# Altium footprint library ICs_VendorSpecific.PcbLib: 247 footprints (part 12 of 19)
Each footprint in its own frame and in the unit in brackets; x right, y up, seen from the top. Pads: shape width x height; smd on the part's side, far side on the other; paste and mask are expansions set on the pad; w line width, h text height; cw(c..) or ccw(c..) is an arc to the next point about the centre after c.
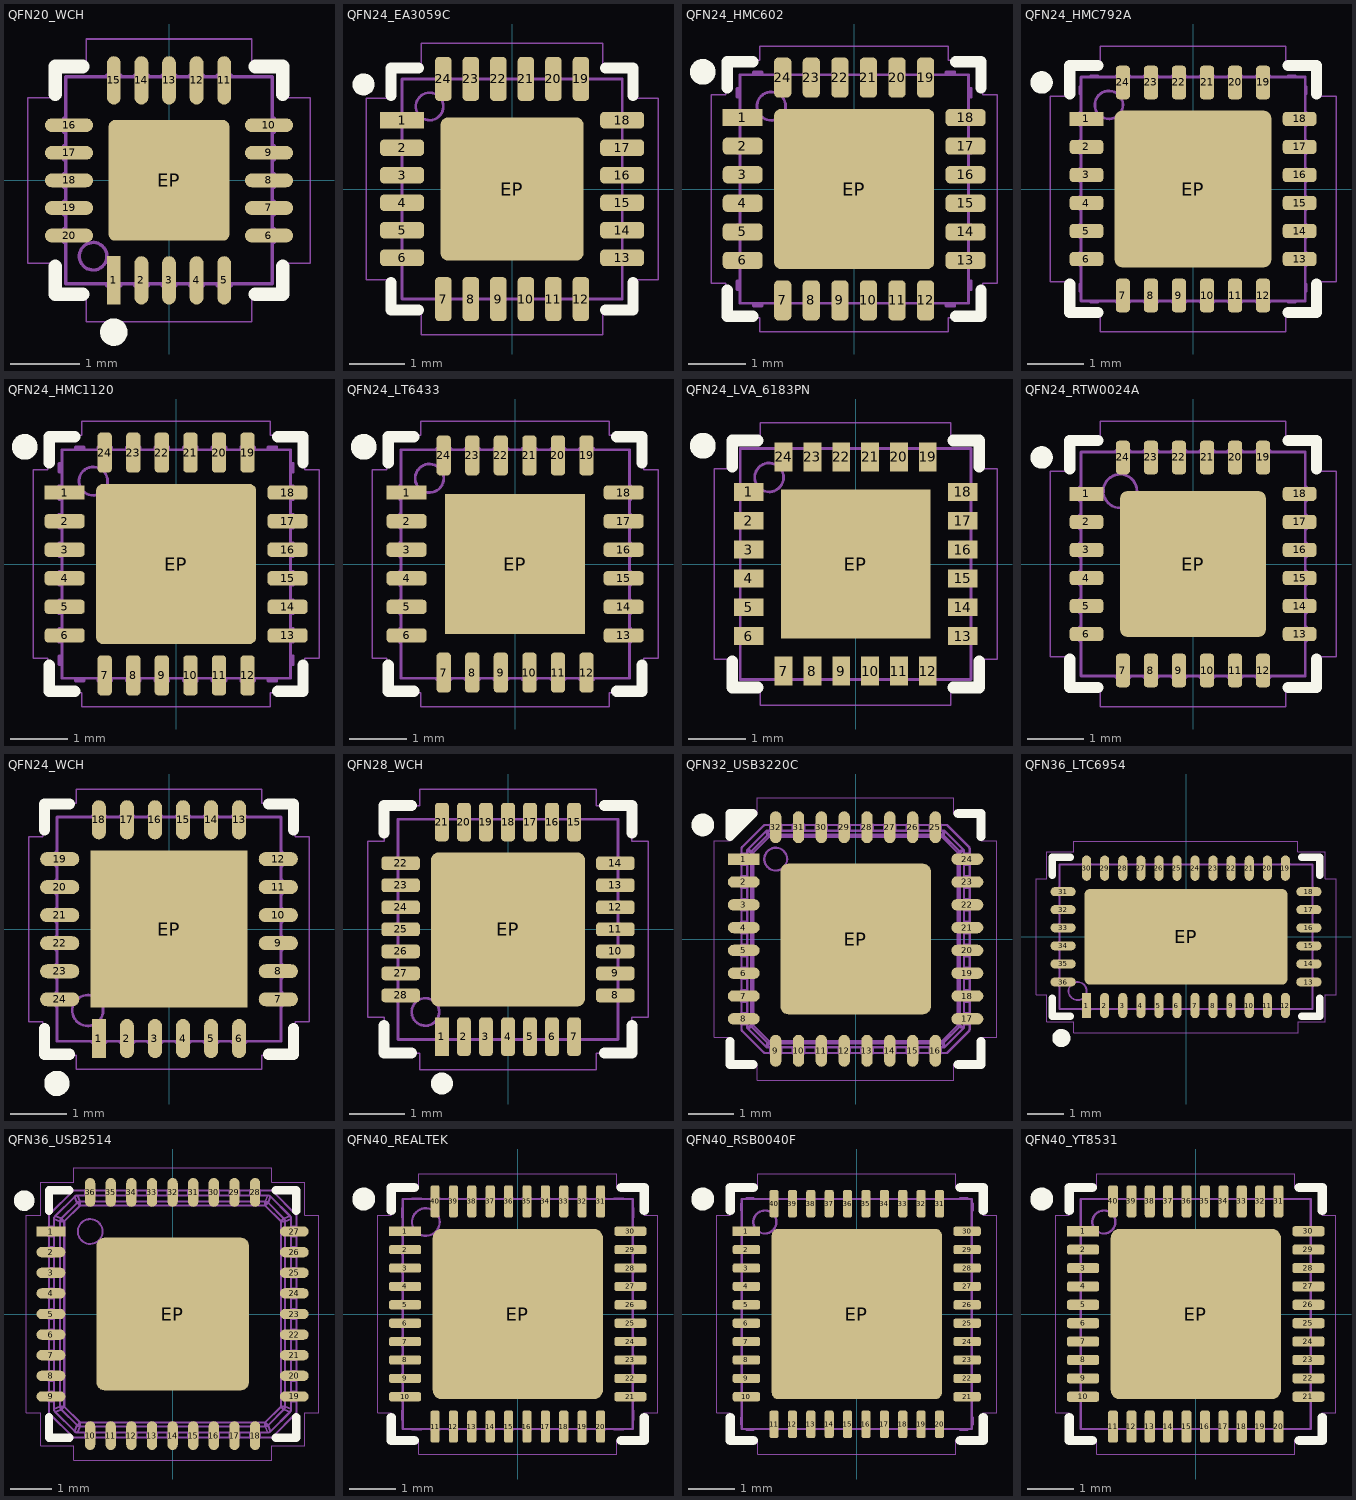
[diagram p11: the footprints below, top view; thin cyan lines are the x and y axes]

## QFN20_WCH [mm] "QFN 3mm x 3mm, 0.4mm pitch"
height 0.75
pads (21):
  rect 0.2x0.7 smd paste-0.025 mask+0.05: 1(-0.8,-1.45)
  oval 0.2x0.7 smd paste-0.025 mask+0.05: 2(-0.4,-1.45) 3(0,-1.45) 4(0.4,-1.45) 5(0.8,-1.45) 11(0.8,1.45) 12(0.4,1.45) 13(0,1.45) 14(-0.4,1.45) 15(-0.8,1.45)
  oval 0.7x0.2 smd paste-0.025 mask+0.05: 6(1.45,-0.8) 7(1.45,-0.4) 8(1.45,0) 9(1.45,0.4) 10(1.45,0.8) 16(-1.45,0.8) 17(-1.45,0.4) 18(-1.45,0) 19(-1.45,-0.4) 20(-1.45,-0.8)
  rrect10% 1.75x1.75 smd paste-3 mask+0.05: EP(0,0)
Top Overlay:
  circle w0.2: c-0.8,-2.2 r0.1
  lines w0.2: -1.65,-1.25 -1.65,-1.65 -1.25,-1.65 ; -1.65,1.25 -1.65,1.65 -1.25,1.65 ; 1.25,-1.65 1.65,-1.65 1.65,-1.25 ; 1.25,1.65 1.65,1.65 1.65,1.25
Top Paste:
  region: 0.7,0.7 0.1,0.7 0.1,0.1 0.7,0.1
  region: -0.1,0.7 -0.7,0.7 -0.7,0.1 -0.1,0.1
  region: 0.7,-0.1 0.1,-0.1 0.1,-0.7 0.7,-0.7
  region: -0.1,-0.1 -0.7,-0.1 -0.7,-0.7 -0.1,-0.7
Top Courtyard:
  lines w0.025: -2.05,-1.2 -1.7,-1.2 -1.7,-1.7 -1.2,-1.7 -1.2,-2.05 1.2,-2.05 1.2,-1.7 1.7,-1.7 1.7,-1.2 2.05,-1.2 2.05,1.2 1.7,1.2 1.7,1.7 1.2,1.7 1.2,2.05 -1.2,2.05 -1.2,1.7 -1.7,1.7 -1.7,1.2 -2.05,1.2 -2.05,-1.2
Top Assembly:
  circle w0.05: c-1.1,-1.1 r0.2
  lines w0.05: -1.5,-0.9 -1.525,-0.9 -1.525,-0.7 -1.5,-0.7 ; -1.5,-0.5 -1.525,-0.5 -1.525,-0.3 -1.5,-0.3 ; -1.5,-0.1 -1.525,-0.1 -1.525,0.1 -1.5,0.1 ; -1.5,0.3 -1.525,0.3 -1.525,0.5 -1.5,0.5 ; -1.5,0.7 -1.525,0.7 -1.525,0.9 -1.5,0.9 ; -0.9,-1.5 -0.9,-1.525 -0.7,-1.525 -0.7,-1.5 ; -0.9,1.5 -0.9,1.525 -0.7,1.525 -0.7,1.5 ; -0.5,-1.5 -0.5,-1.525 -0.3,-1.525 -0.3,-1.5 ; -0.5,1.5 -0.5,1.525 -0.3,1.525 -0.3,1.5 ; -0.1,-1.5 -0.1,-1.525 0.1,-1.525 0.1,-1.5 ; -0.1,1.5 -0.1,1.525 0.1,1.525 0.1,1.5 ; 0.3,-1.5 0.3,-1.525 0.5,-1.525 0.5,-1.5 ; 0.3,1.5 0.3,1.525 0.5,1.525 0.5,1.5 ; 0.7,-1.5 0.7,-1.525 0.9,-1.525 0.9,-1.5 ; 0.7,1.5 0.7,1.525 0.9,1.525 0.9,1.5 ; 1.5,-0.9 1.525,-0.9 1.525,-0.7 1.5,-0.7 ; 1.5,-0.5 1.525,-0.5 1.525,-0.3 1.5,-0.3 ; 1.5,-0.1 1.525,-0.1 1.525,0.1 1.5,0.1 ; 1.5,0.3 1.525,0.3 1.525,0.5 1.5,0.5 ; 1.5,0.7 1.525,0.7 1.525,0.9 1.5,0.9 ; -1.5,-1.5 1.5,-1.5 1.5,1.5 -1.5,1.5 -1.5,-1.5
  text ".Designator" at -2.815,-0.283 h1.25
3D body "QFN20_WCH.x_t": height 0.78, standoff 0, extent -1.525,-1.525 1.525,1.525

## QFN24_EA3059C [mm] "Power QFN 4mm x 4mm, 0.5mm pitch"
height 0.75
pads (25):
  rect 0.8x0.3 smd paste-0.025 mask+0.05: 1(-2,1.25)
  rrect50% 0.8x0.3 smd paste-0.025 mask+0.05: 2(-2,0.75) 3(-2,0.25) 4(-2,-0.25) 5(-2,-0.75) 6(-2,-1.25) 13(2,-1.25) 14(2,-0.75) 15(2,-0.25) 16(2,0.25) 17(2,0.75) 18(2,1.25)
  rrect50% 0.3x0.8 smd paste-0.025 mask+0.05: 7(-1.25,-2) 8(-0.75,-2) 9(-0.25,-2) 10(0.25,-2) 11(0.75,-2) 12(1.25,-2) 19(1.25,2) 20(0.75,2) 21(0.25,2) 22(-0.25,2) 23(-0.75,2) 24(-1.25,2)
  rrect10% 2.6x2.6 smd paste-3 mask+0.05: EP(0,0)
Top Overlay:
  circle w0.2: c-2.7,1.9 r0.1
  lines w0.2: -2.2,-1.7 -2.2,-2.2 -1.7,-2.2 ; -2.2,1.7 -2.2,2.2 -1.7,2.2 ; 1.7,-2.2 2.2,-2.2 2.2,-1.7 ; 1.7,2.2 2.2,2.2 2.2,1.7
Top Paste:
  region: -0.5,0.3 -1.1,0.3 -1.1,-0.3 -0.5,-0.3
  region: 0.3,0.3 -0.3,0.3 -0.3,-0.3 0.3,-0.3
  region: -0.5,1.1 -1.1,1.1 -1.1,0.5 -0.5,0.5
  region: 0.3,1.1 -0.3,1.1 -0.3,0.5 0.3,0.5
  region: 1.1,1.1 0.5,1.1 0.5,0.5 1.1,0.5
  region: 1.1,0.3 0.5,0.3 0.5,-0.3 1.1,-0.3
  region: -0.5,-1.1 -0.5,-0.5 -1.1,-0.5 -1.1,-1.1
  region: 0.3,-1.1 0.3,-0.5 -0.3,-0.5 -0.3,-1.1
  region: 1.1,-1.1 1.1,-0.5 0.5,-0.5 0.5,-1.1
Top Courtyard:
  lines w0.025: -2.65,-1.65 -2.65,1.65 -2.25,1.65 -2.25,2.25 -1.65,2.25 -1.65,2.65 1.65,2.65 1.65,2.25 2.25,2.25 2.25,1.65 2.65,1.65 2.65,-1.65 2.25,-1.65 2.25,-2.25 1.65,-2.25 1.65,-2.65 -1.65,-2.65 -1.65,-2.25 -2.25,-2.25 -2.25,-1.65 -2.65,-1.65
Top Assembly:
  circle w0.05: c-1.5,1.5 r0.25
  lines w0.05: -2,-1.37 -2.025,-1.37 -2.025,-1.13 -2,-1.13 ; -2,-0.87 -2.025,-0.87 -2.025,-0.63 -2,-0.63 ; -2,-0.37 -2.025,-0.37 -2.025,-0.13 -2,-0.13 ; -2,0.13 -2.025,0.13 -2.025,0.37 -2,0.37 ; -2,0.63 -2.025,0.63 -2.025,0.87 -2,0.87 ; -2,1.13 -2.025,1.13 -2.025,1.37 -2,1.37 ; -1.37,-2 -1.37,-2.025 -1.13,-2.025 -1.13,-2 ; -1.37,2 -1.37,2.025 -1.13,2.025 -1.13,2 ; -0.87,-2 -0.87,-2.025 -0.63,-2.025 -0.63,-2 ; -0.87,2 -0.87,2.025 -0.63,2.025 -0.63,2 ; -0.37,-2 -0.37,-2.025 -0.13,-2.025 -0.13,-2 ; -0.37,2 -0.37,2.025 -0.13,2.025 -0.13,2 ; 0.13,-2 0.13,-2.025 0.37,-2.025 0.37,-2 ; 0.13,2 0.13,2.025 0.37,2.025 0.37,2 ; 0.63,-2 0.63,-2.025 0.87,-2.025 0.87,-2 ; 0.63,2 0.63,2.025 0.87,2.025 0.87,2 ; 1.13,-2 1.13,-2.025 1.37,-2.025 1.37,-2 ; 1.13,2 1.13,2.025 1.37,2.025 1.37,2 ; 2,-1.37 2.025,-1.37 2.025,-1.13 2,-1.13 ; 2,-0.87 2.025,-0.87 2.025,-0.63 2,-0.63 ; 2,-0.37 2.025,-0.37 2.025,-0.13 2,-0.13 ; 2,0.13 2.025,0.13 2.025,0.37 2,0.37 ; 2,0.63 2.025,0.63 2.025,0.87 2,0.87 ; 2,1.13 2.025,1.13 2.025,1.37 2,1.37 ; -2,-2 -2,2 2,2 2,-2 -2,-2
  text ".Designator" at -4.511,-0.453 h2
3D body "QFN24_EA3059C.x_t": height 0.9, standoff 0, extent -2.025,-2.025 2.025,2.025

## QFN24_HMC602 [mm] "QFN 4mm x 4mm, 0.5mm pitch"
height 1
pads (25):
  rect 0.7x0.3 smd paste+0 mask+0.05: 1(-1.95,1.25)
  rrect50% 0.7x0.3 smd paste+0 mask+0.05: 2(-1.95,0.75) 3(-1.95,0.25) 4(-1.95,-0.25) 5(-1.95,-0.75) 6(-1.95,-1.25) 13(1.95,-1.25) 14(1.95,-0.75) 15(1.95,-0.25) 16(1.95,0.25) 17(1.95,0.75) 18(1.95,1.25)
  rrect50% 0.3x0.7 smd paste+0 mask+0.05: 7(-1.25,-1.95) 8(-0.75,-1.95) 9(-0.25,-1.95) 10(0.25,-1.95) 11(0.75,-1.95) 12(1.25,-1.95) 19(1.25,1.95) 20(0.75,1.95) 21(0.25,1.95) 22(-0.25,1.95) 23(-0.75,1.95) 24(-1.25,1.95)
  rrect8% 2.8x2.8 smd paste-3 mask+0.05: EP(0,0)
Top Overlay:
  circle w0.25: c-2.65,2.05 r0.1
  lines w0.2: -2.22,-1.775 -2.22,-2.23 -1.775,-2.23 ; -2.22,1.775 -2.22,2.23 -1.775,2.23 ; 1.775,-2.23 2.22,-2.23 2.22,-1.775 ; 1.775,2.23 2.22,2.23 2.22,1.775
Top Paste:
  rectangle: -0.6,-0.6 -0.1,-0.1
  rectangle: 0.1,-0.6 0.6,-0.1
  rectangle: 0.8,-0.6 1.3,-0.1
  region: -0.8,-0.6 -0.8,-0.1 -1.3,-0.1 -1.3,-0.6
  rectangle: -0.6,0.1 -0.1,0.6
  rectangle: 0.1,0.1 0.6,0.6
  rectangle: 0.8,0.1 1.3,0.6
  region: -0.8,0.1 -0.8,0.6 -1.3,0.6 -1.3,0.1
  rectangle: -0.6,0.8 -0.1,1.3
  rectangle: 0.1,0.8 0.6,1.3
  rectangle: 0.8,0.8 1.3,1.3
  region: -0.8,0.8 -0.8,1.3 -1.3,1.3 -1.3,0.8
  rectangle: -0.6,-1.3 -0.1,-0.8
  rectangle: 0.1,-1.3 0.6,-0.8
  rectangle: 0.8,-1.3 1.3,-0.8
  region: -0.8,-1.3 -0.8,-0.8 -1.3,-0.8 -1.3,-1.3
Top Courtyard:
  lines w0.025: -2.5,-1.65 -2.5,1.65 -2.25,1.65 -2.25,2.25 -1.65,2.25 -1.65,2.5 1.65,2.5 1.65,2.25 2.25,2.25 2.25,1.65 2.5,1.65 2.5,-1.65 2.25,-1.65 2.25,-2.25 1.65,-2.25 1.65,-2.5 -1.65,-2.5 -1.65,-2.25 -2.25,-2.25 -2.25,-1.65 -2.5,-1.65
Top Assembly:
  circle w0.05: c-1.45,1.45 r0.25
  lines w0.05: -2,-1.76 -2.05,-1.76 -2.05,-1.61 -2,-1.61 ; -2,-1.37 -2.05,-1.37 -2.05,-1.13 -2,-1.13 ; -2,-0.87 -2.05,-0.87 -2.05,-0.63 -2,-0.63 ; -2,-0.37 -2.05,-0.37 -2.05,-0.13 -2,-0.13 ; -2,0.13 -2.05,0.13 -2.05,0.37 -2,0.37 ; -2,0.63 -2.05,0.63 -2.05,0.87 -2,0.87 ; -2,1.13 -2.05,1.13 -2.05,1.37 -2,1.37 ; -2,1.61 -2.05,1.61 -2.05,1.76 -2,1.76 ; -1.76,-2 -1.76,-2.05 -1.61,-2.05 -1.61,-2 ; -1.76,2 -1.76,2.05 -1.61,2.05 -1.61,2 ; -1.37,-2 -1.37,-2.05 -1.13,-2.05 -1.13,-2 ; -1.37,2 -1.37,2.05 -1.13,2.05 -1.13,2 ; -0.87,-2 -0.87,-2.05 -0.63,-2.05 -0.63,-2 ; -0.87,2 -0.87,2.05 -0.63,2.05 -0.63,2 ; -0.37,-2 -0.37,-2.05 -0.13,-2.05 -0.13,-2 ; -0.37,2 -0.37,2.05 -0.13,2.05 -0.13,2 ; 0.13,-2 0.13,-2.05 0.37,-2.05 0.37,-2 ; 0.13,2 0.13,2.05 0.37,2.05 0.37,2 ; 0.63,-2 0.63,-2.05 0.87,-2.05 0.87,-2 ; 0.63,2 0.63,2.05 0.87,2.05 0.87,2 ; 1.13,-2 1.13,-2.05 1.37,-2.05 1.37,-2 ; 1.13,2 1.13,2.05 1.37,2.05 1.37,2 ; 1.61,-2 1.61,-2.05 1.76,-2.05 1.76,-2 ; 1.61,2 1.61,2.05 1.76,2.05 1.76,2 ; 2,-1.76 2.05,-1.76 2.05,-1.61 2,-1.61 ; 2,-1.37 2.05,-1.37 2.05,-1.13 2,-1.13 ; 2,-0.87 2.05,-0.87 2.05,-0.63 2,-0.63 ; 2,-0.37 2.05,-0.37 2.05,-0.13 2,-0.13 ; 2,0.13 2.05,0.13 2.05,0.37 2,0.37 ; 2,0.63 2.05,0.63 2.05,0.87 2,0.87 ; 2,1.13 2.05,1.13 2.05,1.37 2,1.37 ; 2,1.61 2.05,1.61 2.05,1.76 2,1.76 ; -2,-2 -2,2 2,2 2,-2 -2,-2
  text ".Designator" at -3.378,-0.339 h1.5
3D body "QFN24_HMC602.x_t": height 1.05, standoff 0, extent -2.025,-2.025 2.025,2.025

## QFN24_HMC792A [mm] "QFN 24-leads 4mm x 4mm, 0.5mm pitch"
height 0.9
pads (25):
  rect 0.6x0.25 smd paste+0 mask+0.05: 1(-1.9,1.25)
  rrect50% 0.6x0.25 smd paste+0 mask+0.05: 2(-1.9,0.75) 3(-1.9,0.25) 4(-1.9,-0.25) 5(-1.9,-0.75) 6(-1.9,-1.25) 13(1.9,-1.25) 14(1.9,-0.75) 15(1.9,-0.25) 16(1.9,0.25) 17(1.9,0.75) 18(1.9,1.25)
  rrect50% 0.25x0.6 smd paste+0 mask+0.05: 7(-1.25,-1.9) 8(-0.75,-1.9) 9(-0.25,-1.9) 10(0.25,-1.9) 11(0.75,-1.9) 12(1.25,-1.9) 19(1.25,1.9) 20(0.75,1.9) 21(0.25,1.9) 22(-0.25,1.9) 23(-0.75,1.9) 24(-1.25,1.9)
  rrect10% 2.8x2.8 smd paste-3 mask+0.05: EP(0,0)
Top Overlay:
  circle w0.2: c-2.7,1.9 r0.1
  lines w0.2: -2.2,-1.7 -2.2,-2.2 -1.7,-2.2 ; -2.2,1.7 -2.2,2.2 -1.7,2.2 ; 1.7,-2.2 2.2,-2.2 2.2,-1.7 ; 1.7,2.2 2.2,2.2 2.2,1.7
Top Paste:
  region: 1.2,-1.2 1.2,-0.6 0.6,-0.6 0.6,-1.2
  region: 0.3,-1.2 0.3,-0.6 -0.3,-0.6 -0.3,-1.2
  region: -0.6,-1.2 -0.6,-0.6 -1.2,-0.6 -1.2,-1.2
  region: 1.2,0.3 0.6,0.3 0.6,-0.3 1.2,-0.3
  region: 1.2,1.2 0.6,1.2 0.6,0.6 1.2,0.6
  region: 0.3,1.2 -0.3,1.2 -0.3,0.6 0.3,0.6
  region: -0.6,1.2 -1.2,1.2 -1.2,0.6 -0.6,0.6
  region: 0.3,0.3 -0.3,0.3 -0.3,-0.3 0.3,-0.3
  region: -0.6,0.3 -1.2,0.3 -1.2,-0.3 -0.6,-0.3
Top Courtyard:
  lines w0.025: -2.55,-1.65 -2.25,-1.65 -2.25,-2.25 -1.65,-2.25 -1.65,-2.55 1.65,-2.55 1.65,-2.25 2.25,-2.25 2.25,-1.65 2.55,-1.65 2.55,1.65 2.25,1.65 2.25,2.25 1.65,2.25 1.65,2.55 -1.65,2.55 -1.65,2.25 -2.25,2.25 -2.25,1.65 -2.55,1.65 -2.55,-1.65
Top Assembly:
  circle w0.05: c-1.5,1.5 r0.25
  lines w0.05: -2,-1.825 -2.02,-1.825 -2.02,-1.7 -2,-1.7 ; -2,-1.37 -2.02,-1.37 -2.02,-1.13 -2,-1.13 ; -2,-0.87 -2.02,-0.87 -2.02,-0.63 -2,-0.63 ; -2,-0.37 -2.02,-0.37 -2.02,-0.13 -2,-0.13 ; -2,0.13 -2.02,0.13 -2.02,0.37 -2,0.37 ; -2,0.63 -2.02,0.63 -2.02,0.87 -2,0.87 ; -2,1.13 -2.02,1.13 -2.02,1.37 -2,1.37 ; -2,1.7 -2.02,1.7 -2.02,1.825 -2,1.825 ; -1.825,-2 -1.825,-2.02 -1.7,-2.02 -1.7,-2 ; -1.825,2 -1.825,2.02 -1.7,2.02 -1.7,2 ; -1.37,-2 -1.37,-2.02 -1.13,-2.02 -1.13,-2 ; -1.37,2 -1.37,2.02 -1.13,2.02 -1.13,2 ; -0.87,-2 -0.87,-2.02 -0.63,-2.02 -0.63,-2 ; -0.87,2 -0.87,2.02 -0.63,2.02 -0.63,2 ; -0.37,-2 -0.37,-2.02 -0.13,-2.02 -0.13,-2 ; -0.37,2 -0.37,2.02 -0.13,2.02 -0.13,2 ; 0.13,-2 0.13,-2.02 0.37,-2.02 0.37,-2 ; 0.13,2 0.13,2.02 0.37,2.02 0.37,2 ; 0.63,-2 0.63,-2.02 0.87,-2.02 0.87,-2 ; 0.63,2 0.63,2.02 0.87,2.02 0.87,2 ; 1.13,-2 1.13,-2.02 1.37,-2.02 1.37,-2 ; 1.13,2 1.13,2.02 1.37,2.02 1.37,2 ; 1.7,-2 1.7,-2.02 1.825,-2.02 1.825,-2 ; 1.7,2 1.7,2.02 1.825,2.02 1.825,2 ; 2,-1.825 2.02,-1.825 2.02,-1.7 2,-1.7 ; 2,-1.37 2.02,-1.37 2.02,-1.13 2,-1.13 ; 2,-0.87 2.02,-0.87 2.02,-0.63 2,-0.63 ; 2,-0.37 2.02,-0.37 2.02,-0.13 2,-0.13 ; 2,0.13 2.02,0.13 2.02,0.37 2,0.37 ; 2,0.63 2.02,0.63 2.02,0.87 2,0.87 ; 2,1.13 2.02,1.13 2.02,1.37 2,1.37 ; 2,1.7 2.02,1.7 2.02,1.825 2,1.825 ; -2,-2 -2,2 2,2 2,-2 -2,-2
  text ".Designator" at -4.511,-0.453 h2
3D body "QFN24_HMC792A.x_t": height 0.93, standoff 0.01, extent -2.02,-2.02 2.02,2.02

## QFN24_HMC1120 [mm] "QFN 4mm x 4mm, 0.5mm pitch"
height 1
pads (25):
  rect 0.7x0.25 smd paste+0 mask+0.05: 1(-1.95,1.25)
  rrect50% 0.7x0.25 smd paste+0 mask+0.05: 2(-1.95,0.75) 3(-1.95,0.25) 4(-1.95,-0.25) 5(-1.95,-0.75) 6(-1.95,-1.25) 13(1.95,-1.25) 14(1.95,-0.75) 15(1.95,-0.25) 16(1.95,0.25) 17(1.95,0.75) 18(1.95,1.25)
  rrect50% 0.25x0.7 smd paste+0 mask+0.05: 7(-1.25,-1.95) 8(-0.75,-1.95) 9(-0.25,-1.95) 10(0.25,-1.95) 11(0.75,-1.95) 12(1.25,-1.95) 19(1.25,1.95) 20(0.75,1.95) 21(0.25,1.95) 22(-0.25,1.95) 23(-0.75,1.95) 24(-1.25,1.95)
  rrect8% 2.8x2.8 smd paste-3 mask+0.05: EP(0,0)
Top Overlay:
  circle w0.25: c-2.65,2.05 r0.1
  lines w0.2: -2.22,-1.775 -2.22,-2.23 -1.775,-2.23 ; -2.22,1.775 -2.22,2.23 -1.775,2.23 ; 1.775,-2.23 2.22,-2.23 2.22,-1.775 ; 1.775,2.23 2.22,2.23 2.22,1.775
Top Paste:
  rectangle: -1.35,-1.35 -0.65,-0.65
  rectangle: -0.35,-1.35 0.35,-0.65
  rectangle: 0.65,-1.35 1.35,-0.65
  rectangle: -1.35,-0.35 -0.65,0.35
  rectangle: -0.35,-0.35 0.35,0.35
  rectangle: 0.65,-0.35 1.35,0.35
  rectangle: -1.35,0.65 -0.65,1.35
  rectangle: -0.35,0.65 0.35,1.35
  rectangle: 0.65,0.65 1.35,1.35
Top Courtyard:
  lines w0.025: -2.5,-1.65 -2.25,-1.65 -2.25,-2.25 -1.65,-2.25 -1.65,-2.5 1.65,-2.5 1.65,-2.25 2.25,-2.25 2.25,-1.65 2.5,-1.65 2.5,1.65 2.25,1.65 2.25,2.25 1.65,2.25 1.65,2.5 -1.65,2.5 -1.65,2.25 -2.25,2.25 -2.25,1.65 -2.5,1.65 -2.5,-1.65
Top Assembly:
  circle w0.05: c-1.45,1.45 r0.25
  lines w0.05: -2,-1.76 -2.05,-1.76 -2.05,-1.61 -2,-1.61 ; -2,-1.37 -2.05,-1.37 -2.05,-1.13 -2,-1.13 ; -2,-0.87 -2.05,-0.87 -2.05,-0.63 -2,-0.63 ; -2,-0.37 -2.05,-0.37 -2.05,-0.13 -2,-0.13 ; -2,0.13 -2.05,0.13 -2.05,0.37 -2,0.37 ; -2,0.63 -2.05,0.63 -2.05,0.87 -2,0.87 ; -2,1.13 -2.05,1.13 -2.05,1.37 -2,1.37 ; -2,1.61 -2.05,1.61 -2.05,1.76 -2,1.76 ; -1.76,-2 -1.76,-2.05 -1.61,-2.05 -1.61,-2 ; -1.76,2 -1.76,2.05 -1.61,2.05 -1.61,2 ; -1.37,-2 -1.37,-2.05 -1.13,-2.05 -1.13,-2 ; -1.37,2 -1.37,2.05 -1.13,2.05 -1.13,2 ; -0.87,-2 -0.87,-2.05 -0.63,-2.05 -0.63,-2 ; -0.87,2 -0.87,2.05 -0.63,2.05 -0.63,2 ; -0.37,-2 -0.37,-2.05 -0.13,-2.05 -0.13,-2 ; -0.37,2 -0.37,2.05 -0.13,2.05 -0.13,2 ; 0.13,-2 0.13,-2.05 0.37,-2.05 0.37,-2 ; 0.13,2 0.13,2.05 0.37,2.05 0.37,2 ; 0.63,-2 0.63,-2.05 0.87,-2.05 0.87,-2 ; 0.63,2 0.63,2.05 0.87,2.05 0.87,2 ; 1.13,-2 1.13,-2.05 1.37,-2.05 1.37,-2 ; 1.13,2 1.13,2.05 1.37,2.05 1.37,2 ; 1.61,-2 1.61,-2.05 1.76,-2.05 1.76,-2 ; 1.61,2 1.61,2.05 1.76,2.05 1.76,2 ; 2,-1.76 2.05,-1.76 2.05,-1.61 2,-1.61 ; 2,-1.37 2.05,-1.37 2.05,-1.13 2,-1.13 ; 2,-0.87 2.05,-0.87 2.05,-0.63 2,-0.63 ; 2,-0.37 2.05,-0.37 2.05,-0.13 2,-0.13 ; 2,0.13 2.05,0.13 2.05,0.37 2,0.37 ; 2,0.63 2.05,0.63 2.05,0.87 2,0.87 ; 2,1.13 2.05,1.13 2.05,1.37 2,1.37 ; 2,1.61 2.05,1.61 2.05,1.76 2,1.76 ; -2,-2 2,-2 2,2 -2,2 -2,-2
  text ".Designator" at -3.378,-0.339 h1.5
3D body "QFN24_HMC1120.x_t": height 0.92, standoff 0, extent -2.025,-2.025 2.025,2.025

## QFN24_LT6433 [mm] "QFN, 24-Leads, Body 4x4mm, Pitch 0.50mm, Thermal Pad 2.45x2.45mm. Compliant to JEDEC standards MO-220-WGGD-X"
height 0.75
pads (25):
  rect 0.7x0.25 smd mask+0.05: 1(-1.9,1.25)
  rrect50% 0.7x0.25 smd mask+0.05: 2(-1.9,0.75) 3(-1.9,0.25) 4(-1.9,-0.25) 5(-1.9,-0.75) 6(-1.9,-1.25) 13(1.9,-1.25) 14(1.9,-0.75) 15(1.9,-0.25) 16(1.9,0.25) 17(1.9,0.75) 18(1.9,1.25)
  rrect50% 0.25x0.7 smd mask+0.05: 7(-1.25,-1.9) 8(-0.75,-1.9) 9(-0.25,-1.9) 10(0.25,-1.9) 11(0.75,-1.9) 12(1.25,-1.9) 19(1.25,1.9) 20(0.75,1.9) 21(0.25,1.9) 22(-0.25,1.9) 23(-0.75,1.9) 24(-1.25,1.9)
  rect 2.45x2.45 smd paste-5 mask+0.05: EP(0,0)
Top Overlay:
  circle w0.25: c-2.65,2.05 r0.1
  lines w0.2: -2.22,-1.775 -2.22,-2.23 -1.775,-2.23 ; -2.22,1.775 -2.22,2.23 -1.775,2.23 ; 1.775,-2.23 2.22,-2.23 2.22,-1.775 ; 1.775,2.23 2.22,2.23 2.22,1.775
Top Paste:
  rectangle: -0.3,0.5 0.3,1.1
  rectangle: -1.1,0.5 -0.5,1.1
  rectangle: -0.3,-0.3 0.3,0.3
  rectangle: -1.1,-0.3 -0.5,0.3
  region: 1.1,1.1 0.5,1.1 0.5,0.5 1.1,0.5
  region: 1.1,0.3 0.5,0.3 0.5,-0.3 1.1,-0.3
  rectangle: -0.3,-1.1 0.3,-0.5
  rectangle: -1.1,-1.1 -0.5,-0.5
  region: 1.1,-0.5 0.5,-0.5 0.5,-1.1 1.1,-1.1
Top Courtyard:
  lines w0.025: -2.5,-1.65 -2.25,-1.65 -2.25,-2.25 -1.65,-2.25 -1.65,-2.5 1.65,-2.5 1.65,-2.25 2.25,-2.25 2.25,-1.65 2.5,-1.65 2.5,1.65 2.25,1.65 2.25,2.25 1.65,2.25 1.65,2.5 -1.65,2.5 -1.65,2.25 -2.25,2.25 -2.25,1.65 -2.5,1.65 -2.5,-1.65
Top Assembly:
  circle w0.05: c-1.5,1.5 r0.25
  lines w0.05: -2,-1.375 -2.02,-1.375 -2.02,-1.125 -2,-1.125 ; -2,-0.875 -2.02,-0.875 -2.02,-0.625 -2,-0.625 ; -2,-0.375 -2.02,-0.375 -2.02,-0.125 -2,-0.125 ; -2,0.125 -2.02,0.125 -2.02,0.375 -2,0.375 ; -2,0.625 -2.02,0.625 -2.02,0.875 -2,0.875 ; -2,1.125 -2.02,1.125 -2.02,1.375 -2,1.375 ; -1.375,-2 -1.375,-2.02 -1.125,-2.02 -1.125,-2 ; -1.375,2 -1.375,2.02 -1.125,2.02 -1.125,2 ; -0.875,-2 -0.875,-2.02 -0.625,-2.02 -0.625,-2 ; -0.875,2 -0.875,2.02 -0.625,2.02 -0.625,2 ; -0.375,-2 -0.375,-2.02 -0.125,-2.02 -0.125,-2 ; -0.375,2 -0.375,2.02 -0.125,2.02 -0.125,2 ; 0.125,-2 0.125,-2.02 0.375,-2.02 0.375,-2 ; 0.125,2 0.125,2.02 0.375,2.02 0.375,2 ; 0.625,-2 0.625,-2.02 0.875,-2.02 0.875,-2 ; 0.625,2 0.625,2.02 0.875,2.02 0.875,2 ; 1.125,-2 1.125,-2.02 1.375,-2.02 1.375,-2 ; 1.125,2 1.125,2.02 1.375,2.02 1.375,2 ; 2,-1.375 2.02,-1.375 2.02,-1.125 2,-1.125 ; 2,-0.875 2.02,-0.875 2.02,-0.625 2,-0.625 ; 2,-0.375 2.02,-0.375 2.02,-0.125 2,-0.125 ; 2,0.125 2.02,0.125 2.02,0.375 2,0.375 ; 2,0.625 2.02,0.625 2.02,0.875 2,0.875 ; 2,1.125 2.02,1.125 2.02,1.375 2,1.375 ; -2,-2 -2,2 2,2 2,-2 -2,-2
  text ".Designator" at -4.511,-0.453 h2
3D body "QFN24_LTC6433.x_t": height 0.75, standoff 0, extent -2.02,-2.02 2.02,2.02

## QFN24_LVA_6183PN [mm] "QFN, 24-Leads, Body 4x4mm, Pitch 0.50mm, Thermal Pad 2.65x2.65mm"
height 1
pads (25):
  rect 0.51x0.31 smd mask+0.05: 1(-1.855,1.25) 2(-1.855,0.75) 3(-1.855,0.25) 4(-1.855,-0.25) 5(-1.855,-0.75) 6(-1.855,-1.25) 13(1.855,-1.25) 14(1.855,-0.75) 15(1.855,-0.25) 16(1.855,0.25) 17(1.855,0.75) 18(1.855,1.25)
  rect 0.31x0.51 smd mask+0.05: 7(-1.25,-1.855) 8(-0.75,-1.855) 9(-0.25,-1.855) 10(0.25,-1.855) 11(0.75,-1.855) 12(1.25,-1.855) 19(1.25,1.855) 20(0.75,1.855) 21(0.25,1.855) 22(-0.25,1.855) 23(-0.75,1.855) 24(-1.25,1.855)
  rect 2.59x2.59 smd paste-5 mask+0.05: EP(0,0)
Top Overlay:
  circle w0.25: c-2.65,2.05 r0.1
  lines w0.2: -2.14,-1.686 -2.14,-2.141 -1.695,-2.141 ; -2.14,1.686 -2.14,2.141 -1.695,2.141 ; 1.695,-2.141 2.14,-2.141 2.14,-1.686 ; 1.695,2.141 2.14,2.141 2.14,1.686
Top Paste:
  rectangle: 0.6,0.6 1.2,1.2
  rectangle: -1.2,0.6 -0.6,1.2
  rectangle: -0.3,0.6 0.3,1.2
  rectangle: -1.2,-1.2 -0.6,-0.6
  rectangle: 0.6,-1.2 1.2,-0.6
  rectangle: -0.3,-1.2 0.3,-0.6
  rectangle: 0.6,-0.3 1.2,0.3
  rectangle: -1.2,-0.3 -0.6,0.3
  rectangle: -0.3,-0.3 0.3,0.3
Top Courtyard:
  lines w0.025: -2.45,-1.65 -2.2,-1.65 -2.2,-2.2 -1.65,-2.2 -1.65,-2.45 1.65,-2.45 1.65,-2.2 2.2,-2.2 2.2,-1.65 2.45,-1.65 2.45,1.65 2.2,1.65 2.2,2.2 1.65,2.2 1.65,2.45 -1.65,2.45 -1.65,2.2 -2.2,2.2 -2.2,1.65 -2.45,1.65 -2.45,-1.65
Top Assembly:
  circle w0.05: c-1.5,1.5 r0.25
  lines w0.05: -2,-1.375 -2.02,-1.375 -2.02,-1.125 -2,-1.125 ; -2,-0.875 -2.02,-0.875 -2.02,-0.625 -2,-0.625 ; -2,-0.375 -2.02,-0.375 -2.02,-0.125 -2,-0.125 ; -2,0.125 -2.02,0.125 -2.02,0.375 -2,0.375 ; -2,0.625 -2.02,0.625 -2.02,0.875 -2,0.875 ; -2,1.125 -2.02,1.125 -2.02,1.375 -2,1.375 ; -1.375,-2 -1.375,-2.02 -1.125,-2.02 -1.125,-2 ; -1.375,2 -1.375,2.02 -1.125,2.02 -1.125,2 ; -0.875,-2 -0.875,-2.02 -0.625,-2.02 -0.625,-2 ; -0.875,2 -0.875,2.02 -0.625,2.02 -0.625,2 ; -0.375,-2 -0.375,-2.02 -0.125,-2.02 -0.125,-2 ; -0.375,2 -0.375,2.02 -0.125,2.02 -0.125,2 ; 0.125,-2 0.125,-2.02 0.375,-2.02 0.375,-2 ; 0.125,2 0.125,2.02 0.375,2.02 0.375,2 ; 0.625,-2 0.625,-2.02 0.875,-2.02 0.875,-2 ; 0.625,2 0.625,2.02 0.875,2.02 0.875,2 ; 1.125,-2 1.125,-2.02 1.375,-2.02 1.375,-2 ; 1.125,2 1.125,2.02 1.375,2.02 1.375,2 ; 2,-1.375 2.02,-1.375 2.02,-1.125 2,-1.125 ; 2,-0.875 2.02,-0.875 2.02,-0.625 2,-0.625 ; 2,-0.375 2.02,-0.375 2.02,-0.125 2,-0.125 ; 2,0.125 2.02,0.125 2.02,0.375 2,0.375 ; 2,0.625 2.02,0.625 2.02,0.875 2,0.875 ; 2,1.125 2.02,1.125 2.02,1.375 2,1.375 ; -2,-2 2,-2 2,2 -2,2 -2,-2
  text ".Designator" at -4.511,-0.453 h2
3D body "QFN24_LVA_6183PN.x_t": height 1.01, standoff 0, extent -2.01,-2.01 2.01,2.01

## QFN24_RTW0024A [mm] "WQFN 4mm x 4mm, 0.5mm pitch, TI case style RTW0024A"
height 0.8
pads (25):
  rect 0.6x0.25 smd paste+0 mask+0.05: 1(-1.9,1.25)
  rrect50% 0.6x0.25 smd paste+0 mask+0.05: 2(-1.9,0.75) 3(-1.9,0.25) 4(-1.9,-0.25) 5(-1.9,-0.75) 6(-1.9,-1.25) 13(1.9,-1.25) 14(1.9,-0.75) 15(1.9,-0.25) 16(1.9,0.25) 17(1.9,0.75) 18(1.9,1.25)
  rrect50% 0.25x0.6 smd paste+0 mask+0.05: 7(-1.25,-1.9) 8(-0.75,-1.9) 9(-0.25,-1.9) 10(0.25,-1.9) 11(0.75,-1.9) 12(1.25,-1.9) 19(1.25,1.9) 20(0.75,1.9) 21(0.25,1.9) 22(-0.25,1.9) 23(-0.75,1.9) 24(-1.25,1.9)
  rrect10% 2.6x2.6 smd paste-3 mask+0.05: EP(0,0)
Top Overlay:
  circle w0.2: c-2.7,1.9 r0.1
  lines w0.2: -2.2,-1.7 -2.2,-2.2 -1.7,-2.2 ; -2.2,1.7 -2.2,2.2 -1.7,2.2 ; 1.7,-2.2 2.2,-2.2 2.2,-1.7 ; 1.7,2.2 2.2,2.2 2.2,1.7
Top Paste:
  region: 1.2,-1.2 1.2,-0.6 0.6,-0.6 0.6,-1.2
  region: 0.3,-1.2 0.3,-0.6 -0.3,-0.6 -0.3,-1.2
  region: -0.6,-1.2 -0.6,-0.6 -1.2,-0.6 -1.2,-1.2
  region: 1.2,0.3 0.6,0.3 0.6,-0.3 1.2,-0.3
  region: 1.2,1.2 0.6,1.2 0.6,0.6 1.2,0.6
  region: 0.3,1.2 -0.3,1.2 -0.3,0.6 0.3,0.6
  region: -0.6,1.2 -1.2,1.2 -1.2,0.6 -0.6,0.6
  region: 0.3,0.3 -0.3,0.3 -0.3,-0.3 0.3,-0.3
  region: -0.6,0.3 -1.2,0.3 -1.2,-0.3 -0.6,-0.3
Top Courtyard:
  lines w0.025: -2.55,-1.65 -2.25,-1.65 -2.25,-2.25 -1.65,-2.25 -1.65,-2.55 1.65,-2.55 1.65,-2.25 2.25,-2.25 2.25,-1.65 2.55,-1.65 2.55,1.65 2.25,1.65 2.25,2.25 1.65,2.25 1.65,2.55 -1.65,2.55 -1.65,2.25 -2.25,2.25 -2.25,1.65 -2.55,1.65 -2.55,-1.65
Top Assembly:
  circle w0.05: c-1.3,1.3 r0.3
  lines w0.05: -2,-1.375 -2.025,-1.375 -2.025,-1.125 -2,-1.125 ; -2,-0.875 -2.025,-0.875 -2.025,-0.625 -2,-0.625 ; -2,-0.375 -2.025,-0.375 -2.025,-0.125 -2,-0.125 ; -2,0.125 -2.025,0.125 -2.025,0.375 -2,0.375 ; -2,0.625 -2.025,0.625 -2.025,0.875 -2,0.875 ; -2,1.125 -2.025,1.125 -2.025,1.375 -2,1.375 ; -1.375,-2 -1.375,-2.025 -1.125,-2.025 -1.125,-2 ; -1.375,2 -1.375,2.025 -1.125,2.025 -1.125,2 ; -0.875,-2 -0.875,-2.025 -0.625,-2.025 -0.625,-2 ; -0.875,2 -0.875,2.025 -0.625,2.025 -0.625,2 ; -0.375,-2 -0.375,-2.025 -0.125,-2.025 -0.125,-2 ; -0.375,2 -0.375,2.025 -0.125,2.025 -0.125,2 ; 0.125,-2 0.125,-2.025 0.375,-2.025 0.375,-2 ; 0.125,2 0.125,2.025 0.375,2.025 0.375,2 ; 0.625,-2 0.625,-2.025 0.875,-2.025 0.875,-2 ; 0.625,2 0.625,2.025 0.875,2.025 0.875,2 ; 1.125,-2 1.125,-2.025 1.375,-2.025 1.375,-2 ; 1.125,2 1.125,2.025 1.375,2.025 1.375,2 ; 2,-1.375 2.025,-1.375 2.025,-1.125 2,-1.125 ; 2,-0.875 2.025,-0.875 2.025,-0.625 2,-0.625 ; 2,-0.375 2.025,-0.375 2.025,-0.125 2,-0.125 ; 2,0.125 2.025,0.125 2.025,0.375 2,0.375 ; 2,0.625 2.025,0.625 2.025,0.875 2,0.875 ; 2,1.125 2.025,1.125 2.025,1.375 2,1.375 ; -2,-2 2,-2 2,2 -2,2 -2,-2
  text ".Designator" at -4.511,-0.453 h2
3D body "RTW0024A.x_t": height 0.83, standoff 0, extent -2.025,-2.025 2.025,2.025

## QFN24_WCH [mm] "QFN, 24-Leads, Body 4x4mm, Pitch 0.50mm, Thermal Pad 2.8x2.8mm"
height 0.65
pads (25):
  rect 0.25x0.7 smd mask+0.05: 1(-1.25,-1.95)
  oval 0.25x0.7 smd mask+0.05: 2(-0.75,-1.95) 3(-0.25,-1.95) 4(0.25,-1.95) 5(0.75,-1.95) 6(1.25,-1.95) 13(1.25,1.95) 14(0.75,1.95) 15(0.25,1.95) 16(-0.25,1.95) 17(-0.75,1.95) 18(-1.25,1.95)
  oval 0.7x0.25 smd mask+0.05: 7(1.95,-1.25) 8(1.95,-0.75) 9(1.95,-0.25) 10(1.95,0.25) 11(1.95,0.75) 12(1.95,1.25) 19(-1.95,1.25) 20(-1.95,0.75) 21(-1.95,0.25) 22(-1.95,-0.25) 23(-1.95,-0.75) 24(-1.95,-1.25)
  rect 2.8x2.8 smd paste-5 mask+0.05: EP(0,0)
Top Overlay:
  circle w0.25: c-2,-2.75 r0.1
  lines w0.2: -2.22,-1.775 -2.22,-2.23 -1.775,-2.23 ; -2.22,1.775 -2.22,2.23 -1.775,2.23 ; 1.775,-2.23 2.22,-2.23 2.22,-1.775 ; 1.775,2.23 2.22,2.23 2.22,1.775
Top Paste:
  region: 1.1,-0.5 0.5,-0.5 0.5,-1.1 1.1,-1.1
  rectangle: -1.1,-1.1 -0.5,-0.5
  rectangle: -0.3,-1.1 0.3,-0.5
  region: 1.1,0.3 0.5,0.3 0.5,-0.3 1.1,-0.3
  region: 1.1,1.1 0.5,1.1 0.5,0.5 1.1,0.5
  rectangle: -1.1,-0.3 -0.5,0.3
  rectangle: -0.3,-0.3 0.3,0.3
  rectangle: -1.1,0.5 -0.5,1.1
  rectangle: -0.3,0.5 0.3,1.1
Top Courtyard:
  lines w0.025: -2.5,-1.65 -2.5,1.65 -2.25,1.65 -2.25,2.25 -1.65,2.25 -1.65,2.5 1.65,2.5 1.65,2.25 2.25,2.25 2.25,1.65 2.5,1.65 2.5,-1.65 2.25,-1.65 2.25,-2.25 1.65,-2.25 1.65,-2.5 -1.65,-2.5 -1.65,-2.25 -2.25,-2.25 -2.25,-1.65 -2.5,-1.65
Top Assembly:
  circle w0.05: c-1.45,-1.45 r0.275
  lines w0.05: -2,-1.375 -2.02,-1.375 -2.02,-1.125 -2,-1.125 ; -2,-0.875 -2.02,-0.875 -2.02,-0.625 -2,-0.625 ; -2,-0.375 -2.02,-0.375 -2.02,-0.125 -2,-0.125 ; -2,0.125 -2.02,0.125 -2.02,0.375 -2,0.375 ; -2,0.625 -2.02,0.625 -2.02,0.875 -2,0.875 ; -2,1.125 -2.02,1.125 -2.02,1.375 -2,1.375 ; -1.375,-2 -1.375,-2.02 -1.125,-2.02 -1.125,-2 ; -1.375,2 -1.375,2.02 -1.125,2.02 -1.125,2 ; -0.875,-2 -0.875,-2.02 -0.625,-2.02 -0.625,-2 ; -0.875,2 -0.875,2.02 -0.625,2.02 -0.625,2 ; -0.375,-2 -0.375,-2.02 -0.125,-2.02 -0.125,-2 ; -0.375,2 -0.375,2.02 -0.125,2.02 -0.125,2 ; 0.125,-2 0.125,-2.02 0.375,-2.02 0.375,-2 ; 0.125,2 0.125,2.02 0.375,2.02 0.375,2 ; 0.625,-2 0.625,-2.02 0.875,-2.02 0.875,-2 ; 0.625,2 0.625,2.02 0.875,2.02 0.875,2 ; 1.125,-2 1.125,-2.02 1.375,-2.02 1.375,-2 ; 1.125,2 1.125,2.02 1.375,2.02 1.375,2 ; 2,-1.375 2.02,-1.375 2.02,-1.125 2,-1.125 ; 2,-0.875 2.02,-0.875 2.02,-0.625 2,-0.625 ; 2,-0.375 2.02,-0.375 2.02,-0.125 2,-0.125 ; 2,0.125 2.02,0.125 2.02,0.375 2,0.375 ; 2,0.625 2.02,0.625 2.02,0.875 2,0.875 ; 2,1.125 2.02,1.125 2.02,1.375 2,1.375 ; -2,-2 2,-2 2,2 -2,2 -2,-2
  text ".Designator" at -4.511,-0.453 h2
3D body "QFN24_CH448F.x_t": height 0.67, standoff 0, extent -2.02,-2.02 2.02,2.02

## QFN28_WCH [mm] "QFN 4mm x 4mm, 0.4mm pitch"
height 0.8
pads (29):
  rect 0.25x0.7 smd paste-0.025 mask+0.05: 1(-1.2,-1.95)
  rrect50% 0.25x0.7 smd paste-0.025 mask+0.05: 2(-0.8,-1.95) 3(-0.4,-1.95) 4(0,-1.95) 5(0.4,-1.95) 6(0.8,-1.95) 7(1.2,-1.95) 15(1.2,1.95) 16(0.8,1.95) 17(0.4,1.95) 18(0,1.95) 19(-0.4,1.95) 20(-0.8,1.95) 21(-1.2,1.95)
  rrect50% 0.7x0.25 smd paste-0.025 mask+0.05: 8(1.95,-1.2) 9(1.95,-0.8) 10(1.95,-0.4) 11(1.95,0) 12(1.95,0.4) 13(1.95,0.8) 14(1.95,1.2) 22(-1.95,1.2) 23(-1.95,0.8) 24(-1.95,0.4) 25(-1.95,0) 26(-1.95,-0.4) 27(-1.95,-0.8) 28(-1.95,-1.2)
  rrect10% 2.8x2.8 smd paste-3 mask+0.05: EP(0,0)
Top Overlay:
  circle w0.2: c-1.2,-2.8 r0.1
  lines w0.2: -2.25,-1.75 -2.25,-2.25 -1.75,-2.25 ; -2.25,1.75 -2.25,2.25 -1.75,2.25 ; 1.75,-2.25 2.25,-2.25 2.25,-1.75 ; 1.75,2.25 2.25,2.25 2.25,1.75
Top Paste:
  region: 1.1,-1.1 1.1,-0.5 0.5,-0.5 0.5,-1.1
  region: 0.3,-1.1 0.3,-0.5 -0.3,-0.5 -0.3,-1.1
  region: -0.5,-1.1 -0.5,-0.5 -1.1,-0.5 -1.1,-1.1
  region: 1.1,0.3 0.5,0.3 0.5,-0.3 1.1,-0.3
  region: 1.1,1.1 0.5,1.1 0.5,0.5 1.1,0.5
  region: 0.3,1.1 -0.3,1.1 -0.3,0.5 0.3,0.5
  region: -0.5,1.1 -1.1,1.1 -1.1,0.5 -0.5,0.5
  region: 0.3,0.3 -0.3,0.3 -0.3,-0.3 0.3,-0.3
  region: -0.5,0.3 -1.1,0.3 -1.1,-0.3 -0.5,-0.3
Top Courtyard:
  lines w0.025: -2.55,-1.6 -2.25,-1.6 -2.25,-2.25 -1.6,-2.25 -1.6,-2.55 1.6,-2.55 1.6,-2.25 2.25,-2.25 2.25,-1.6 2.55,-1.6 2.55,1.6 2.25,1.6 2.25,2.25 1.6,2.25 1.6,2.55 -1.6,2.55 -1.6,2.25 -2.25,2.25 -2.25,1.6 -2.55,1.6 -2.55,-1.6
Top Assembly:
  circle w0.05: c-1.5,-1.5 r0.25
  lines w0.05: -2,-1.3 -2.025,-1.3 -2.025,-1.1 -2,-1.1 ; -2,-0.9 -2.025,-0.9 -2.025,-0.7 -2,-0.7 ; -2,-0.5 -2.025,-0.5 -2.025,-0.3 -2,-0.3 ; -2,-0.1 -2.025,-0.1 -2.025,0.1 -2,0.1 ; -2,0.3 -2.025,0.3 -2.025,0.5 -2,0.5 ; -2,0.7 -2.025,0.7 -2.025,0.9 -2,0.9 ; -2,1.1 -2.025,1.1 -2.025,1.3 -2,1.3 ; -1.3,-2 -1.3,-2.025 -1.1,-2.025 -1.1,-2 ; -1.3,2 -1.3,2.025 -1.1,2.025 -1.1,2 ; -0.9,-2 -0.9,-2.025 -0.7,-2.025 -0.7,-2 ; -0.9,2 -0.9,2.025 -0.7,2.025 -0.7,2 ; -0.5,-2 -0.5,-2.025 -0.3,-2.025 -0.3,-2 ; -0.5,2 -0.5,2.025 -0.3,2.025 -0.3,2 ; -0.1,-2 -0.1,-2.025 0.1,-2.025 0.1,-2 ; -0.1,2 -0.1,2.025 0.1,2.025 0.1,2 ; 0.3,-2 0.3,-2.025 0.5,-2.025 0.5,-2 ; 0.3,2 0.3,2.025 0.5,2.025 0.5,2 ; 0.7,-2 0.7,-2.025 0.9,-2.025 0.9,-2 ; 0.7,2 0.7,2.025 0.9,2.025 0.9,2 ; 1.1,-2 1.1,-2.025 1.3,-2.025 1.3,-2 ; 1.1,2 1.1,2.025 1.3,2.025 1.3,2 ; 2,-1.3 2.025,-1.3 2.025,-1.1 2,-1.1 ; 2,-0.9 2.025,-0.9 2.025,-0.7 2,-0.7 ; 2,-0.5 2.025,-0.5 2.025,-0.3 2,-0.3 ; 2,-0.1 2.025,-0.1 2.025,0.1 2,0.1 ; 2,0.3 2.025,0.3 2.025,0.5 2,0.5 ; 2,0.7 2.025,0.7 2.025,0.9 2,0.9 ; 2,1.1 2.025,1.1 2.025,1.3 2,1.3 ; -2,-2 -2,2 2,2 2,-2 -2,-2
  text ".Designator" at -4.511,-0.453 h2
3D body "QFN28_WCH.x_t": height 0.78, standoff 0, extent -2.025,-2.025 2.025,2.025

## QFN32_USB3220C [mm] "QFN, 32-Leads, Body 5x5mm, Pitch 0.50mm, Thermal Pad 3.30x3.30mm."
height 0.85
pads (33):
  rect 0.7x0.25 smd paste+0 mask+0.05: 1(-2.45,1.75)
  oval 0.7x0.25 smd paste+0 mask+0.05: 2(-2.45,1.25) 3(-2.45,0.75) 4(-2.45,0.25) 5(-2.45,-0.25) 6(-2.45,-0.75) 7(-2.45,-1.25) 8(-2.45,-1.75) 17(2.45,-1.75) 18(2.45,-1.25) 19(2.45,-0.75) 20(2.45,-0.25) 21(2.45,0.25) 22(2.45,0.75) 23(2.45,1.25) 24(2.45,1.75)
  oval 0.25x0.7 smd paste+0 mask+0.05: 9(-1.75,-2.45) 10(-1.25,-2.45) 11(-0.75,-2.45) 12(-0.25,-2.45) 13(0.25,-2.45) 14(0.75,-2.45) 15(1.25,-2.45) 16(1.75,-2.45) 25(1.75,2.45) 26(1.25,2.45) 27(0.75,2.45) 28(0.25,2.45) 29(-0.25,2.45) 30(-0.75,2.45) 31(-1.25,2.45) 32(-1.75,2.45)
  rrect10% 3.3x3.3 smd paste-10 mask+0.05: EP(0,0)
Top Overlay:
  circle w0.25: c-3.35,2.5 r0.125
  region: -2.75,2.75 -2.75,2.25 -2.25,2.75
  lines w0.2: -2.75,-2.25 -2.75,-2.75 -2.25,-2.75 ; 2.25,-2.75 2.75,-2.75 2.75,-2.25 ; 2.25,2.75 2.75,2.75 2.75,2.25 ; -2.75,2.25 -2.25,2.75 -2.75,2.75 -2.75,2.25
Top Paste:
  rectangle: 0.7,0.7 1.5,1.5
  rectangle: 0.7,-0.4 1.5,0.4
  rectangle: 0.7,-1.5 1.5,-0.7
  rectangle: -0.4,0.7 0.4,1.5
  rectangle: -1.5,0.7 -0.7,1.5
  rectangle: -1.5,-0.4 -0.7,0.4
  rectangle: -0.4,-0.4 0.4,0.4
  rectangle: -1.5,-1.5 -0.7,-0.7
  rectangle: -0.4,-1.5 0.4,-0.7
Top Courtyard:
  lines w0.025: -3.1,-2.15 -2.75,-2.15 -2.75,-2.75 -2.15,-2.75 -2.15,-3.1 2.15,-3.1 2.15,-2.75 2.75,-2.75 2.75,-2.15 3.1,-2.15 3.1,2.15 2.75,2.15 2.75,2.75 2.15,2.75 2.15,3.1 -2.15,3.1 -2.15,2.75 -2.75,2.75 -2.75,2.15 -3.1,2.15 -3.1,-2.15
Top Assembly:
  drawing of 217 lines, arcs and shapes, not listed
  text ".Designator" at -4.511,-0.453 h2
3D body "QFN32_USB3320C.x_t": height 0.86, standoff 0, extent -2.51,-2.51 2.51,2.51

## QFN36_LTC6954 [mm] "QFN, 36-Leads, Body 4x7mm, Pitch 0.50mm, Thermal Pad 2.64x5.61mm. Reference LTC DWG # 05-08-1863 Rev O"
height 1
pads (37):
  rect 0.25x0.7 smd paste+0 mask+0.05: 1(-2.75,-1.9)
  oval 0.25x0.7 smd paste+0 mask+0.05: 2(-2.25,-1.9) 3(-1.75,-1.9) 4(-1.25,-1.9) 5(-0.75,-1.9) 6(-0.25,-1.9) 7(0.25,-1.9) 8(0.75,-1.9) 9(1.25,-1.9) 10(1.75,-1.9) 11(2.25,-1.9) 12(2.75,-1.9) 19(2.75,1.9) 20(2.25,1.9) 21(1.75,1.9) 22(1.25,1.9) 23(0.75,1.9) 24(0.25,1.9) 25(-0.25,1.9) 26(-0.75,1.9) 27(-1.25,1.9) 28(-1.75,1.9) 29(-2.25,1.9) 30(-2.75,1.9)
  oval 0.7x0.25 smd paste+0 mask+0.05: 13(3.4,-1.25) 14(3.4,-0.75) 15(3.4,-0.25) 16(3.4,0.25) 17(3.4,0.75) 18(3.4,1.25) 31(-3.4,1.25) 32(-3.4,0.75) 33(-3.4,0.25) 34(-3.4,-0.25) 35(-3.4,-0.75) 36(-3.4,-1.25)
  rrect10% 5.61x2.64 smd paste-10 mask+0.05: EP(0,0)
Top Overlay:
  circle w0.25: c-3.45,-2.8 r0.125
  lines w0.2: -3.7,-1.7 -3.7,-2.2 -3.2,-2.2 ; -3.7,1.7 -3.7,2.2 -3.2,2.2 ; 3.2,-2.2 3.7,-2.2 3.7,-1.7 ; 3.2,2.2 3.7,2.2 3.7,1.7
Top Paste:
  region: -1.05,-1.2 -1.05,-0.6 -1.65,-0.6 -1.65,-1.2
  region: -1.05,-0.3 -1.05,0.3 -1.65,0.3 -1.65,-0.3
  region: -1.05,0.6 -1.05,1.2 -1.65,1.2 -1.65,0.6
  region: 1.65,-1.2 1.65,-0.6 1.05,-0.6 1.05,-1.2
  region: 1.65,-0.3 1.65,0.3 1.05,0.3 1.05,-0.3
  region: 1.65,0.6 1.65,1.2 1.05,1.2 1.05,0.6
  region: 0.75,-1.2 0.75,-0.6 0.15,-0.6 0.15,-1.2
  region: 0.75,-0.3 0.75,0.3 0.15,0.3 0.15,-0.3
  region: 0.75,0.6 0.75,1.2 0.15,1.2 0.15,0.6
  region: -0.15,-1.2 -0.15,-0.6 -0.75,-0.6 -0.75,-1.2
  region: -0.15,-0.3 -0.15,0.3 -0.75,0.3 -0.75,-0.3
  region: -0.15,0.6 -0.15,1.2 -0.75,1.2 -0.75,0.6
  region: -1.95,-1.2 -1.95,-0.6 -2.55,-0.6 -2.55,-1.2
  region: -1.95,-0.3 -1.95,0.3 -2.55,0.3 -2.55,-0.3
  region: -1.95,0.6 -1.95,1.2 -2.55,1.2 -2.55,0.6
  region: 2.55,-1.2 2.55,-0.6 1.95,-0.6 1.95,-1.2
  region: 2.55,-0.3 2.55,0.3 1.95,0.3 1.95,-0.3
  region: 2.55,0.6 2.55,1.2 1.95,1.2 1.95,0.6
Top Courtyard:
  lines w0.025: -4.15,-1.6 -4.15,1.6 -3.85,1.6 -3.85,2.35 -3.1,2.35 -3.1,2.65 3.091,2.65 3.091,2.35 3.85,2.35 3.85,1.6 4.15,1.6 4.15,-1.6 3.85,-1.6 3.85,-2.35 3.1,-2.35 3.1,-2.65 -3.1,-2.65 -3.1,-2.35 -3.85,-2.35 -3.85,-1.6 -4.15,-1.6
Top Assembly:
  circle w0.05: c-3,-1.5 r0.25
  lines w0.05: -3.5,-1.375 -3.52,-1.375 -3.52,-1.125 -3.5,-1.125 ; -3.5,-0.875 -3.52,-0.875 -3.52,-0.625 -3.5,-0.625 ; -3.5,-0.375 -3.52,-0.375 -3.52,-0.125 -3.5,-0.125 ; -3.5,0.125 -3.52,0.125 -3.52,0.375 -3.5,0.375 ; -3.5,0.625 -3.52,0.625 -3.52,0.875 -3.5,0.875 ; -3.5,1.125 -3.52,1.125 -3.52,1.375 -3.5,1.375 ; -2.875,-2 -2.875,-2.02 -2.625,-2.02 -2.625,-2 ; -2.875,2 -2.875,2.02 -2.625,2.02 -2.625,2 ; -2.375,-2 -2.375,-2.02 -2.125,-2.02 -2.125,-2 ; -2.375,2 -2.375,2.02 -2.125,2.02 -2.125,2 ; -1.875,-2 -1.875,-2.02 -1.625,-2.02 -1.625,-2 ; -1.875,2 -1.875,2.02 -1.625,2.02 -1.625,2 ; -1.375,-2 -1.375,-2.02 -1.125,-2.02 -1.125,-2 ; -1.375,2 -1.375,2.02 -1.125,2.02 -1.125,2 ; -0.875,-2 -0.875,-2.02 -0.625,-2.02 -0.625,-2 ; -0.875,2 -0.875,2.02 -0.625,2.02 -0.625,2 ; -0.375,-2 -0.375,-2.02 -0.125,-2.02 -0.125,-2 ; -0.375,2 -0.375,2.02 -0.125,2.02 -0.125,2 ; 0.125,-2 0.125,-2.02 0.375,-2.02 0.375,-2 ; 0.125,2 0.125,2.02 0.375,2.02 0.375,2 ; 0.625,-2 0.625,-2.02 0.875,-2.02 0.875,-2 ; 0.625,2 0.625,2.02 0.875,2.02 0.875,2 ; 1.125,-2 1.125,-2.02 1.375,-2.02 1.375,-2 ; 1.125,2 1.125,2.02 1.375,2.02 1.375,2 ; 1.625,-2 1.625,-2.02 1.875,-2.02 1.875,-2 ; 1.625,2 1.625,2.02 1.875,2.02 1.875,2 ; 2.125,-2 2.125,-2.02 2.375,-2.02 2.375,-2 ; 2.125,2 2.125,2.02 2.375,2.02 2.375,2 ; 2.625,-2 2.625,-2.02 2.875,-2.02 2.875,-2 ; 2.625,2 2.625,2.02 2.875,2.02 2.875,2 ; 3.5,-1.375 3.52,-1.375 3.52,-1.125 3.5,-1.125 ; 3.5,-0.875 3.52,-0.875 3.52,-0.625 3.5,-0.625 ; 3.5,-0.375 3.52,-0.375 3.52,-0.125 3.5,-0.125 ; 3.5,0.125 3.52,0.125 3.52,0.375 3.5,0.375 ; 3.5,0.625 3.52,0.625 3.52,0.875 3.5,0.875 ; 3.5,1.125 3.52,1.125 3.52,1.375 3.5,1.375 ; -3.5,-2 3.5,-2 3.5,2 -3.5,2 -3.5,-2
  text ".Designator" at -4.511,-0.453 h2
3D body "QFN36_LTC6954.x_t": height 0.77, standoff 0, extent -3.52,-2.02 3.52,2.02

## QFN36_USB2514 [mm] "QFN, 36-Leads, Body 6x6mm, Pitch 0.50mm, Thermal Pad 3.70x3.70mm."
height 1
pads (37):
  rect 0.7x0.25 smd paste+0 mask+0.05: 1(-2.95,2)
  oval 0.7x0.25 smd paste+0 mask+0.05: 2(-2.95,1.5) 3(-2.95,1) 4(-2.95,0.5) 5(-2.95,0) 6(-2.95,-0.5) 7(-2.95,-1) 8(-2.95,-1.5) 9(-2.95,-2) 19(2.95,-2) 20(2.95,-1.5) 21(2.95,-1) 22(2.95,-0.5) 23(2.95,0) 24(2.95,0.5) 25(2.95,1) 26(2.95,1.5) 27(2.95,2)
  oval 0.25x0.7 smd paste+0 mask+0.05: 10(-2,-2.95) 11(-1.5,-2.95) 12(-1,-2.95) 13(-0.5,-2.95) 14(0,-2.95) 15(0.5,-2.95) 16(1,-2.95) 17(1.5,-2.95) 18(2,-2.95) 28(2,2.95) 29(1.5,2.95) 30(1,2.95) 31(0.5,2.95) 32(0,2.95) 33(-0.5,2.95) 34(-1,2.95) 35(-1.5,2.95) 36(-2,2.95)
  rrect10% 3.7x3.7 smd paste-10 mask+0.05: EP(0,0)
Top Overlay:
  circle w0.25: c-3.6,2.75 r0.125
  lines w0.2: -3,-2.5 -3,-3 -2.5,-3 ; -3,2.5 -3,3 -2.5,3 ; 2.5,-3 3,-3 3,-2.5 ; 2.5,3 3,3 3,2.5
Top Paste:
  rectangle: -1.65,1.05 -1.05,1.65
  rectangle: -0.75,1.05 -0.15,1.65
  rectangle: 0.15,1.05 0.75,1.65
  rectangle: 1.05,1.05 1.65,1.65
  rectangle: -1.65,-1.65 -1.05,-1.05
  rectangle: -0.75,-1.65 -0.15,-1.05
  rectangle: 0.15,-1.65 0.75,-1.05
  rectangle: 1.05,-1.65 1.65,-1.05
  rectangle: -1.65,-0.75 -1.05,-0.15
  rectangle: -0.75,-0.75 -0.15,-0.15
  rectangle: 0.15,-0.75 0.75,-0.15
  rectangle: 1.05,-0.75 1.65,-0.15
  rectangle: -1.65,0.15 -1.05,0.75
  rectangle: -0.75,0.15 -0.15,0.75
  rectangle: 0.15,0.15 0.75,0.75
  rectangle: 1.05,0.15 1.65,0.75
Top Courtyard:
  lines w0.025: -3.55,-2.4 -3.55,2.4 -3.2,2.4 -3.2,3.2 -2.4,3.2 -2.4,3.55 2.4,3.55 2.4,3.2 3.2,3.2 3.2,2.4 3.55,2.4 3.55,-2.391 3.2,-2.391 3.2,-3.2 2.4,-3.2 2.4,-3.55 -2.4,-3.55 -2.4,-3.2 -3.2,-3.2 -3.2,-2.4 -3.55,-2.4
Top Assembly:
  drawing of 225 lines, arcs and shapes, not listed
  text ".Designator" at -4.511,-0.453 h2
3D body "QFN36_USB2514.x_t": height 1, standoff 0, extent -3.005,-3.005 3.005,3.005

## QFN40_REALTEK [mm] "QFN, 40-Leads, Body 5x5mm, Pitch 0.40mm, Thermal Pad 3.70x3.70mm."
height 0.85
pads (41):
  rect 0.7x0.2 smd paste+0 mask+0.05: 1(-2.45,1.8)
  rrect50% 0.7x0.2 smd paste+0 mask+0.05: 2(-2.45,1.4) 3(-2.45,1) 4(-2.45,0.6) 5(-2.45,0.2) 6(-2.45,-0.2) 7(-2.45,-0.6) 8(-2.45,-1) 9(-2.45,-1.4) 10(-2.45,-1.8) 21(2.45,-1.8) 22(2.45,-1.4) 23(2.45,-1) 24(2.45,-0.6) 25(2.45,-0.2) 26(2.45,0.2) 27(2.45,0.6) 28(2.45,1) 29(2.45,1.4) 30(2.45,1.8)
  rrect50% 0.2x0.7 smd paste+0 mask+0.05: 11(-1.8,-2.45) 12(-1.4,-2.45) 13(-1,-2.45) 14(-0.6,-2.45) 15(-0.2,-2.45) 16(0.2,-2.45) 17(0.6,-2.45) 18(1,-2.45) 19(1.4,-2.45) 20(1.8,-2.45) 31(1.8,2.45) 32(1.4,2.45) 33(1,2.45) 34(0.6,2.45) 35(0.2,2.45) 36(-0.2,2.45) 37(-0.6,2.45) 38(-1,2.45) 39(-1.4,2.45) 40(-1.8,2.45)
  rrect10% 3.7x3.7 smd paste-10 mask+0.05: EP(0,0)
Top Overlay:
  circle w0.25: c-3.35,2.5 r0.125
  lines w0.2: -2.75,-2.25 -2.75,-2.75 -2.25,-2.75 ; -2.75,2.25 -2.75,2.75 -2.25,2.75 ; 2.25,-2.75 2.75,-2.75 2.75,-2.25 ; 2.25,2.75 2.75,2.75 2.75,2.25
Top Paste:
  rectangle: 1.225,-1.775 1.775,-1.225
  rectangle: -1.775,-1.775 -1.225,-1.225
  rectangle: -1.025,-1.775 -0.475,-1.225
  rectangle: -0.275,-1.775 0.275,-1.225
  rectangle: 0.475,-1.775 1.025,-1.225
  rectangle: 1.225,1.225 1.775,1.775
  rectangle: 1.225,0.475 1.775,1.025
  rectangle: 1.225,-1.025 1.775,-0.475
  rectangle: 1.225,-0.275 1.775,0.275
  rectangle: -1.775,1.225 -1.225,1.775
  rectangle: -1.025,1.225 -0.475,1.775
  rectangle: -0.275,1.225 0.275,1.775
  rectangle: 0.475,1.225 1.025,1.775
  rectangle: 0.475,0.475 1.025,1.025
  rectangle: -0.275,0.475 0.275,1.025
  rectangle: -1.025,0.475 -0.475,1.025
  rectangle: -1.775,0.475 -1.225,1.025
  rectangle: -1.775,-1.025 -1.225,-0.475
  rectangle: -1.025,-1.025 -0.475,-0.475
  rectangle: -0.275,-1.025 0.275,-0.475
  rectangle: 0.475,-1.025 1.025,-0.475
  rectangle: 0.475,-0.275 1.025,0.275
  rectangle: -0.275,-0.275 0.275,0.275
  rectangle: -1.025,-0.275 -0.475,0.275
  rectangle: -1.775,-0.275 -1.225,0.275
Top Courtyard:
  lines w0.025: -3.05,-2.15 -2.75,-2.15 -2.75,-2.75 -2.15,-2.75 -2.15,-3.05 2.15,-3.05 2.15,-2.75 2.75,-2.75 2.75,-2.15 3.05,-2.15 3.05,2.15 2.75,2.15 2.75,2.75 2.15,2.75 2.15,3.05 -2.15,3.05 -2.15,2.75 -2.75,2.75 -2.75,2.15 -3.05,2.15 -3.05,-2.15
Top Assembly:
  circle w0.05: c-2,2 r0.3
  lines w0.05: -2.5,-2.3 -2.51,-2.3 -2.51,-2.1 -2.5,-2.1 ; -2.5,-1.9 -2.51,-1.9 -2.51,-1.7 -2.5,-1.7 ; -2.5,-1.5 -2.51,-1.5 -2.51,-1.3 -2.5,-1.3 ; -2.5,-1.1 -2.51,-1.1 -2.51,-0.9 -2.5,-0.9 ; -2.5,-0.7 -2.51,-0.7 -2.51,-0.5 -2.5,-0.5 ; -2.5,-0.3 -2.51,-0.3 -2.51,-0.1 -2.5,-0.1 ; -2.5,0.1 -2.51,0.1 -2.51,0.3 -2.5,0.3 ; -2.5,0.5 -2.51,0.5 -2.51,0.7 -2.5,0.7 ; -2.5,0.9 -2.51,0.9 -2.51,1.1 -2.5,1.1 ; -2.5,1.3 -2.51,1.3 -2.51,1.5 -2.5,1.5 ; -2.5,1.7 -2.51,1.7 -2.51,1.9 -2.5,1.9 ; -2.5,2.1 -2.51,2.1 -2.51,2.3 -2.5,2.3 ; -2.3,-2.5 -2.3,-2.51 -2.1,-2.51 -2.1,-2.5 ; -2.3,2.5 -2.3,2.51 -2.1,2.51 -2.1,2.5 ; -1.9,-2.5 -1.9,-2.51 -1.7,-2.51 -1.7,-2.5 ; -1.9,2.5 -1.9,2.51 -1.7,2.51 -1.7,2.5 ; -1.5,-2.5 -1.5,-2.51 -1.3,-2.51 -1.3,-2.5 ; -1.5,2.5 -1.5,2.51 -1.3,2.51 -1.3,2.5 ; -1.1,-2.5 -1.1,-2.51 -0.9,-2.51 -0.9,-2.5 ; -1.1,2.5 -1.1,2.51 -0.9,2.51 -0.9,2.5 ; -0.7,-2.5 -0.7,-2.51 -0.5,-2.51 -0.5,-2.5 ; -0.7,2.5 -0.7,2.51 -0.5,2.51 -0.5,2.5 ; -0.3,-2.5 -0.3,-2.51 -0.1,-2.51 -0.1,-2.5 ; -0.3,2.5 -0.3,2.51 -0.1,2.51 -0.1,2.5 ; 0.1,-2.5 0.1,-2.51 0.3,-2.51 0.3,-2.5 ; 0.1,2.5 0.1,2.51 0.3,2.51 0.3,2.5 ; 0.5,-2.5 0.5,-2.51 0.7,-2.51 0.7,-2.5 ; 0.5,2.5 0.5,2.51 0.7,2.51 0.7,2.5 ; 0.9,-2.5 0.9,-2.51 1.1,-2.51 1.1,-2.5 ; 0.9,2.5 0.9,2.51 1.1,2.51 1.1,2.5 ; 1.3,-2.5 1.3,-2.51 1.5,-2.51 1.5,-2.5 ; 1.3,2.5 1.3,2.51 1.5,2.51 1.5,2.5 ; 1.7,-2.5 1.7,-2.51 1.9,-2.51 1.9,-2.5 ; 1.7,2.5 1.7,2.51 1.9,2.51 1.9,2.5 ; 2.1,-2.5 2.1,-2.51 2.3,-2.51 2.3,-2.5 ; 2.1,2.5 2.1,2.51 2.3,2.51 2.3,2.5 ; 2.5,-2.3 2.51,-2.3 2.51,-2.1 2.5,-2.1 ; 2.5,-1.9 2.51,-1.9 2.51,-1.7 2.5,-1.7 ; 2.5,-1.5 2.51,-1.5 2.51,-1.3 2.5,-1.3 ; 2.5,-1.1 2.51,-1.1 2.51,-0.9 2.5,-0.9 ; 2.5,-0.7 2.51,-0.7 2.51,-0.5 2.5,-0.5 ; 2.5,-0.3 2.51,-0.3 2.51,-0.1 2.5,-0.1 ; 2.5,0.1 2.51,0.1 2.51,0.3 2.5,0.3 ; 2.5,0.5 2.51,0.5 2.51,0.7 2.5,0.7 ; 2.5,0.9 2.51,0.9 2.51,1.1 2.5,1.1 ; 2.5,1.3 2.51,1.3 2.51,1.5 2.5,1.5 ; 2.5,1.7 2.51,1.7 2.51,1.9 2.5,1.9 ; 2.5,2.1 2.51,2.1 2.51,2.3 2.5,2.3 ; -2.5,-2.5 -2.5,2.5 2.5,2.5 2.5,-2.5 -2.5,-2.5
  text ".Designator" at -4.511,-0.453 h2
3D body "QFN40_REALTEK_X_T.x_t": height 0.85, standoff 0, extent -2.51,-2.51 2.51,2.51

## QFN40_RSB0040F [mm] "QFN, 40-Leads, Body 5x5mm, Pitch 0.40mm, Thermal Pad 3.70x3.70mm."
height 0.85
pads (41):
  rect 0.6x0.2 smd paste+0 mask+0.05: 1(-2.4,1.8)
  rrect50% 0.6x0.2 smd paste+0 mask+0.05: 2(-2.4,1.4) 3(-2.4,1) 4(-2.4,0.6) 5(-2.4,0.2) 6(-2.4,-0.2) 7(-2.4,-0.6) 8(-2.4,-1) 9(-2.4,-1.4) 10(-2.4,-1.8) 21(2.4,-1.8) 22(2.4,-1.4) 23(2.4,-1) 24(2.4,-0.6) 25(2.4,-0.2) 26(2.4,0.2) 27(2.4,0.6) 28(2.4,1) 29(2.4,1.4) 30(2.4,1.8)
  rrect50% 0.2x0.6 smd paste+0 mask+0.05: 11(-1.8,-2.4) 12(-1.4,-2.4) 13(-1,-2.4) 14(-0.6,-2.4) 15(-0.2,-2.4) 16(0.2,-2.4) 17(0.6,-2.4) 18(1,-2.4) 19(1.4,-2.4) 20(1.8,-2.4) 31(1.8,2.4) 32(1.4,2.4) 33(1,2.4) 34(0.6,2.4) 35(0.2,2.4) 36(-0.2,2.4) 37(-0.6,2.4) 38(-1,2.4) 39(-1.4,2.4) 40(-1.8,2.4)
  rrect7% 3.7x3.7 smd paste-10 mask+0.05: EP(0,0)
Top Overlay:
  circle w0.25: c-3.35,2.5 r0.125
  lines w0.2: -2.75,-2.25 -2.75,-2.75 -2.25,-2.75 ; -2.75,2.25 -2.75,2.75 -2.25,2.75 ; 2.25,-2.75 2.75,-2.75 2.75,-2.25 ; 2.25,2.75 2.75,2.75 2.75,2.25
Top Paste:
  drawing of 9 lines, arcs and shapes, not listed
Top Courtyard:
  lines w0.025: -3.05,-2.15 -2.75,-2.15 -2.75,-2.75 -2.15,-2.75 -2.15,-3.05 2.15,-3.05 2.15,-2.75 2.75,-2.75 2.75,-2.15 3.05,-2.15 3.05,2.15 2.75,2.15 2.75,2.75 2.15,2.75 2.15,3.05 -2.15,3.05 -2.15,2.75 -2.75,2.75 -2.75,2.15 -3.05,2.15 -3.05,-2.15
Top Assembly:
  circle w0.05: c-2,2 r0.25
  lines w0.05: -2.5,-2.4 -2.52,-2.4 -2.52,-2.25 -2.5,-2.25 ; -2.5,-1.875 -2.52,-1.875 -2.52,-1.725 -2.5,-1.725 ; -2.5,-1.475 -2.52,-1.475 -2.52,-1.325 -2.5,-1.325 ; -2.5,-1.075 -2.52,-1.075 -2.52,-0.925 -2.5,-0.925 ; -2.5,-0.675 -2.52,-0.675 -2.52,-0.525 -2.5,-0.525 ; -2.5,-0.275 -2.52,-0.275 -2.52,-0.125 -2.5,-0.125 ; -2.5,0.125 -2.52,0.125 -2.52,0.275 -2.5,0.275 ; -2.5,0.525 -2.52,0.525 -2.52,0.675 -2.5,0.675 ; -2.5,0.925 -2.52,0.925 -2.52,1.075 -2.5,1.075 ; -2.5,1.325 -2.52,1.325 -2.52,1.475 -2.5,1.475 ; -2.5,1.725 -2.52,1.725 -2.52,1.875 -2.5,1.875 ; -2.5,2.25 -2.52,2.25 -2.52,2.4 -2.5,2.4 ; -2.4,-2.5 -2.4,-2.52 -2.25,-2.52 -2.25,-2.5 ; -2.4,2.5 -2.4,2.52 -2.25,2.52 -2.25,2.5 ; -1.875,-2.5 -1.875,-2.52 -1.725,-2.52 -1.725,-2.5 ; -1.875,2.5 -1.875,2.52 -1.725,2.52 -1.725,2.5 ; -1.475,-2.5 -1.475,-2.52 -1.325,-2.52 -1.325,-2.5 ; -1.475,2.5 -1.475,2.52 -1.325,2.52 -1.325,2.5 ; -1.075,-2.5 -1.075,-2.52 -0.925,-2.52 -0.925,-2.5 ; -1.075,2.5 -1.075,2.52 -0.925,2.52 -0.925,2.5 ; -0.675,-2.5 -0.675,-2.52 -0.525,-2.52 -0.525,-2.5 ; -0.675,2.5 -0.675,2.52 -0.525,2.52 -0.525,2.5 ; -0.275,-2.5 -0.275,-2.52 -0.125,-2.52 -0.125,-2.5 ; -0.275,2.5 -0.275,2.52 -0.125,2.52 -0.125,2.5 ; 0.125,-2.5 0.125,-2.52 0.275,-2.52 0.275,-2.5 ; 0.125,2.5 0.125,2.52 0.275,2.52 0.275,2.5 ; 0.525,-2.5 0.525,-2.52 0.675,-2.52 0.675,-2.5 ; 0.525,2.5 0.525,2.52 0.675,2.52 0.675,2.5 ; 0.925,-2.5 0.925,-2.52 1.075,-2.52 1.075,-2.5 ; 0.925,2.5 0.925,2.52 1.075,2.52 1.075,2.5 ; 1.325,-2.5 1.325,-2.52 1.475,-2.52 1.475,-2.5 ; 1.325,2.5 1.325,2.52 1.475,2.52 1.475,2.5 ; 1.725,-2.5 1.725,-2.52 1.875,-2.52 1.875,-2.5 ; 1.725,2.5 1.725,2.52 1.875,2.52 1.875,2.5 ; 2.25,-2.5 2.25,-2.52 2.4,-2.52 2.4,-2.5 ; 2.25,2.5 2.25,2.52 2.4,2.52 2.4,2.5 ; 2.5,-2.4 2.52,-2.4 2.52,-2.25 2.5,-2.25 ; 2.5,-1.875 2.52,-1.875 2.52,-1.725 2.5,-1.725 ; 2.5,-1.475 2.52,-1.475 2.52,-1.325 2.5,-1.325 ; 2.5,-1.075 2.52,-1.075 2.52,-0.925 2.5,-0.925 ; 2.5,-0.675 2.52,-0.675 2.52,-0.525 2.5,-0.525 ; 2.5,-0.275 2.52,-0.275 2.52,-0.125 2.5,-0.125 ; 2.5,0.125 2.52,0.125 2.52,0.275 2.5,0.275 ; 2.5,0.525 2.52,0.525 2.52,0.675 2.5,0.675 ; 2.5,0.925 2.52,0.925 2.52,1.075 2.5,1.075 ; 2.5,1.325 2.52,1.325 2.52,1.475 2.5,1.475 ; 2.5,1.725 2.52,1.725 2.52,1.875 2.5,1.875 ; 2.5,2.25 2.52,2.25 2.52,2.4 2.5,2.4 ; -2.5,-2.5 2.5,-2.5 2.5,2.5 -2.5,2.5 -2.5,-2.5
  text ".Designator" at -4.511,-0.453 h2
3D body "QFN40_RSB0040F.x_t": height 0.77, standoff 0, extent -2.52,-2.52 2.52,2.52

## QFN40_YT8531 [mm] "QFN, 40-Leads, Body 5x5mm, Pitch 0.40mm, Thermal Pad 3.70x3.70mm."
height 0.85
pads (41):
  rect 0.7x0.22 smd paste+0 mask+0.05: 1(-2.45,1.8)
  rrect50% 0.7x0.22 smd paste+0 mask+0.05: 2(-2.45,1.4) 3(-2.45,1) 4(-2.45,0.6) 5(-2.45,0.2) 6(-2.45,-0.2) 7(-2.45,-0.6) 8(-2.45,-1) 9(-2.45,-1.4) 10(-2.45,-1.8) 21(2.45,-1.8) 22(2.45,-1.4) 23(2.45,-1) 24(2.45,-0.6) 25(2.45,-0.2) 26(2.45,0.2) 27(2.45,0.6) 28(2.45,1) 29(2.45,1.4) 30(2.45,1.8)
  rrect50% 0.22x0.7 smd paste+0 mask+0.05: 11(-1.8,-2.45) 12(-1.4,-2.45) 13(-1,-2.45) 14(-0.6,-2.45) 15(-0.2,-2.45) 16(0.2,-2.45) 17(0.6,-2.45) 18(1,-2.45) 19(1.4,-2.45) 20(1.8,-2.45) 31(1.8,2.45) 32(1.4,2.45) 33(1,2.45) 34(0.6,2.45) 35(0.2,2.45) 36(-0.2,2.45) 37(-0.6,2.45) 38(-1,2.45) 39(-1.4,2.45) 40(-1.8,2.45)
  rrect10% 3.7x3.7 smd paste-10 mask+0.05: EP(0,0)
Top Overlay:
  circle w0.25: c-3.35,2.5 r0.125
  lines w0.2: -2.75,-2.25 -2.75,-2.75 -2.25,-2.75 ; -2.75,2.25 -2.75,2.75 -2.25,2.75 ; 2.25,-2.75 2.75,-2.75 2.75,-2.25 ; 2.25,2.75 2.75,2.75 2.75,2.25
Top Paste:
  rectangle: -1.775,-0.275 -1.225,0.275
  rectangle: -1.025,-0.275 -0.475,0.275
  rectangle: -0.275,-0.275 0.275,0.275
  rectangle: 0.475,-0.275 1.025,0.275
  rectangle: 0.475,-1.025 1.025,-0.475
  rectangle: -0.275,-1.025 0.275,-0.475
  rectangle: -1.025,-1.025 -0.475,-0.475
  rectangle: -1.775,-1.025 -1.225,-0.475
  rectangle: -1.775,0.475 -1.225,1.025
  rectangle: -1.025,0.475 -0.475,1.025
  rectangle: -0.275,0.475 0.275,1.025
  rectangle: 0.475,0.475 1.025,1.025
  rectangle: 0.475,1.225 1.025,1.775
  rectangle: -0.275,1.225 0.275,1.775
  rectangle: -1.025,1.225 -0.475,1.775
  rectangle: -1.775,1.225 -1.225,1.775
  rectangle: 1.225,-0.275 1.775,0.275
  rectangle: 1.225,-1.025 1.775,-0.475
  rectangle: 1.225,0.475 1.775,1.025
  rectangle: 1.225,1.225 1.775,1.775
  rectangle: 0.475,-1.775 1.025,-1.225
  rectangle: -0.275,-1.775 0.275,-1.225
  rectangle: -1.025,-1.775 -0.475,-1.225
  rectangle: -1.775,-1.775 -1.225,-1.225
  rectangle: 1.225,-1.775 1.775,-1.225
Top Courtyard:
  lines w0.025: -3.05,-2.15 -3.05,2.15 -2.75,2.15 -2.75,2.75 -2.15,2.75 -2.15,3.05 2.15,3.05 2.15,2.75 2.75,2.75 2.75,2.15 3.05,2.15 3.05,-2.15 2.75,-2.15 2.75,-2.75 2.15,-2.75 2.15,-3.05 -2.15,-3.05 -2.15,-2.75 -2.75,-2.75 -2.75,-2.15 -3.05,-2.15
Top Assembly:
  circle w0.05: c-2,2 r0.25
  lines w0.05: -2.5,-1.875 -2.52,-1.875 -2.52,-1.725 -2.5,-1.725 ; -2.5,-1.475 -2.52,-1.475 -2.52,-1.325 -2.5,-1.325 ; -2.5,-1.075 -2.52,-1.075 -2.52,-0.925 -2.5,-0.925 ; -2.5,-0.675 -2.52,-0.675 -2.52,-0.525 -2.5,-0.525 ; -2.5,-0.275 -2.52,-0.275 -2.52,-0.125 -2.5,-0.125 ; -2.5,0.125 -2.52,0.125 -2.52,0.275 -2.5,0.275 ; -2.5,0.525 -2.52,0.525 -2.52,0.675 -2.5,0.675 ; -2.5,0.925 -2.52,0.925 -2.52,1.075 -2.5,1.075 ; -2.5,1.325 -2.52,1.325 -2.52,1.475 -2.5,1.475 ; -2.5,1.725 -2.52,1.725 -2.52,1.875 -2.5,1.875 ; -1.875,-2.5 -1.875,-2.52 -1.725,-2.52 -1.725,-2.5 ; -1.875,2.5 -1.875,2.52 -1.725,2.52 -1.725,2.5 ; -1.475,-2.5 -1.475,-2.52 -1.325,-2.52 -1.325,-2.5 ; -1.475,2.5 -1.475,2.52 -1.325,2.52 -1.325,2.5 ; -1.075,-2.5 -1.075,-2.52 -0.925,-2.52 -0.925,-2.5 ; -1.075,2.5 -1.075,2.52 -0.925,2.52 -0.925,2.5 ; -0.675,-2.5 -0.675,-2.52 -0.525,-2.52 -0.525,-2.5 ; -0.675,2.5 -0.675,2.52 -0.525,2.52 -0.525,2.5 ; -0.275,-2.5 -0.275,-2.52 -0.125,-2.52 -0.125,-2.5 ; -0.275,2.5 -0.275,2.52 -0.125,2.52 -0.125,2.5 ; 0.125,-2.5 0.125,-2.52 0.275,-2.52 0.275,-2.5 ; 0.125,2.5 0.125,2.52 0.275,2.52 0.275,2.5 ; 0.525,-2.5 0.525,-2.52 0.675,-2.52 0.675,-2.5 ; 0.525,2.5 0.525,2.52 0.675,2.52 0.675,2.5 ; 0.925,-2.5 0.925,-2.52 1.075,-2.52 1.075,-2.5 ; 0.925,2.5 0.925,2.52 1.075,2.52 1.075,2.5 ; 1.325,-2.5 1.325,-2.52 1.475,-2.52 1.475,-2.5 ; 1.325,2.5 1.325,2.52 1.475,2.52 1.475,2.5 ; 1.725,-2.5 1.725,-2.52 1.875,-2.52 1.875,-2.5 ; 1.725,2.5 1.725,2.52 1.875,2.52 1.875,2.5 ; 2.5,-1.875 2.52,-1.875 2.52,-1.725 2.5,-1.725 ; 2.5,-1.475 2.52,-1.475 2.52,-1.325 2.5,-1.325 ; 2.5,-1.075 2.52,-1.075 2.52,-0.925 2.5,-0.925 ; 2.5,-0.675 2.52,-0.675 2.52,-0.525 2.5,-0.525 ; 2.5,-0.275 2.52,-0.275 2.52,-0.125 2.5,-0.125 ; 2.5,0.125 2.52,0.125 2.52,0.275 2.5,0.275 ; 2.5,0.525 2.52,0.525 2.52,0.675 2.5,0.675 ; 2.5,0.925 2.52,0.925 2.52,1.075 2.5,1.075 ; 2.5,1.325 2.52,1.325 2.52,1.475 2.5,1.475 ; 2.5,1.725 2.52,1.725 2.52,1.875 2.5,1.875 ; -2.5,-2.5 2.5,-2.5 2.5,2.5 -2.5,2.5 -2.5,-2.5
  text ".Designator" at -4.511,-0.453 h2
3D body "QFN40_YT8531C.x_t": height 0.87, standoff 0, extent -2.52,-2.52 2.52,2.52